# EAGLE library part LM75 (library madhu)
Digital temperature sensor.
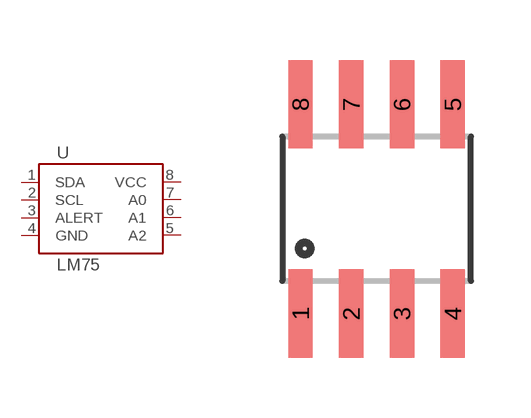
[diagram p23: symbol with the pads of SOIC-8; footprint SOIC-8]

Designator prefix U

## LM75D  [SOIC-8]
1  SDA
2  SCL
3  ALERT
4  GND  pwr
5  A2
6  A1
7  A0
8  VCC  pwr

## Footprint SOIC-8 (pad centres in mm)
Small Outline Package Fits JEDEC packages (narrow SOIC-8)
smd 0.61 x 2.21: 1 -1.905,-2.616; 2 -0.635,-2.616; 3 0.635,-2.616; 4 1.905,-2.616; 5 1.905,2.616; 6 0.635,2.616; 7 -0.635,2.616; 8 -1.905,2.616